# Altium schematic symbol library PedalParts.SchLib: 1 symbol
Pins are listed as number, name and electrical type; pins without a type are passive.

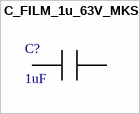
[diagram p0: symbol C_FILM_1u_63V_MKS2]

## C_FILM_1u_63V_MKS2
designator C?, comment 1uF
Film Cap PET, 1uf 63V, 5mm
footprint MKS2C041001F00KSSD-Footprint-1
pins: 1, 2